# Altium schematic symbol library CMT-7525-80-SMT-TR.SchLib: 1 symbol
Pins are listed as number, name and electrical type; pins without a type are passive.

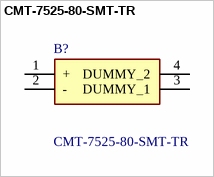
[diagram p0: symbol CMT-7525-80-SMT-TR]

## CMT-7525-80-SMT-TR
designator B?
7.5 mm, 3.6 Vo-p, 80 dB, Surface Mount (SMT), Magnetic Audio Transducer Buzzer; Manufacturer_Name: Same Sky; Geometry.Height: 2.7mm; Manufacturer_Part_Number: CMT-7525-80-SMT-TR; Mouser Part Number: 490-CMT-7525-80SMTTR; Mouser Price/Stock: https://www.mouser.co.uk/ProductDetail/Same-Sky/CMT-7525-80-SMT-TR?qs=P1JMDcb91o5izP7Xira9ww%3D%3D; Arrow Part Number: CMT-7525-80-SMT-TR; Arrow Price/Stock: https://www.arrow.com/en/products/cmt-7525-80-smt-tr/cui-devices?region=nac; Datasheet Link: https://www.sameskydevices.com/product/resource/cmt-7525-80-smt-tr.pdf
footprint CMT752580SMTTR
pins: 1 +, 2 -, 3 DUMMY_1, 4 DUMMY_2